# Altium footprint library amirlib.PcbLib: 456 footprints (part 6 of 29)
Each footprint in its own frame and in the unit in brackets; x right, y up, seen from the top. Pads: shape width x height; smd on the part's side, far side on the other; paste and mask are expansions set on the pad; w line width, h text height; cw(c..) or ccw(c..) is an arc to the next point about the centre after c.
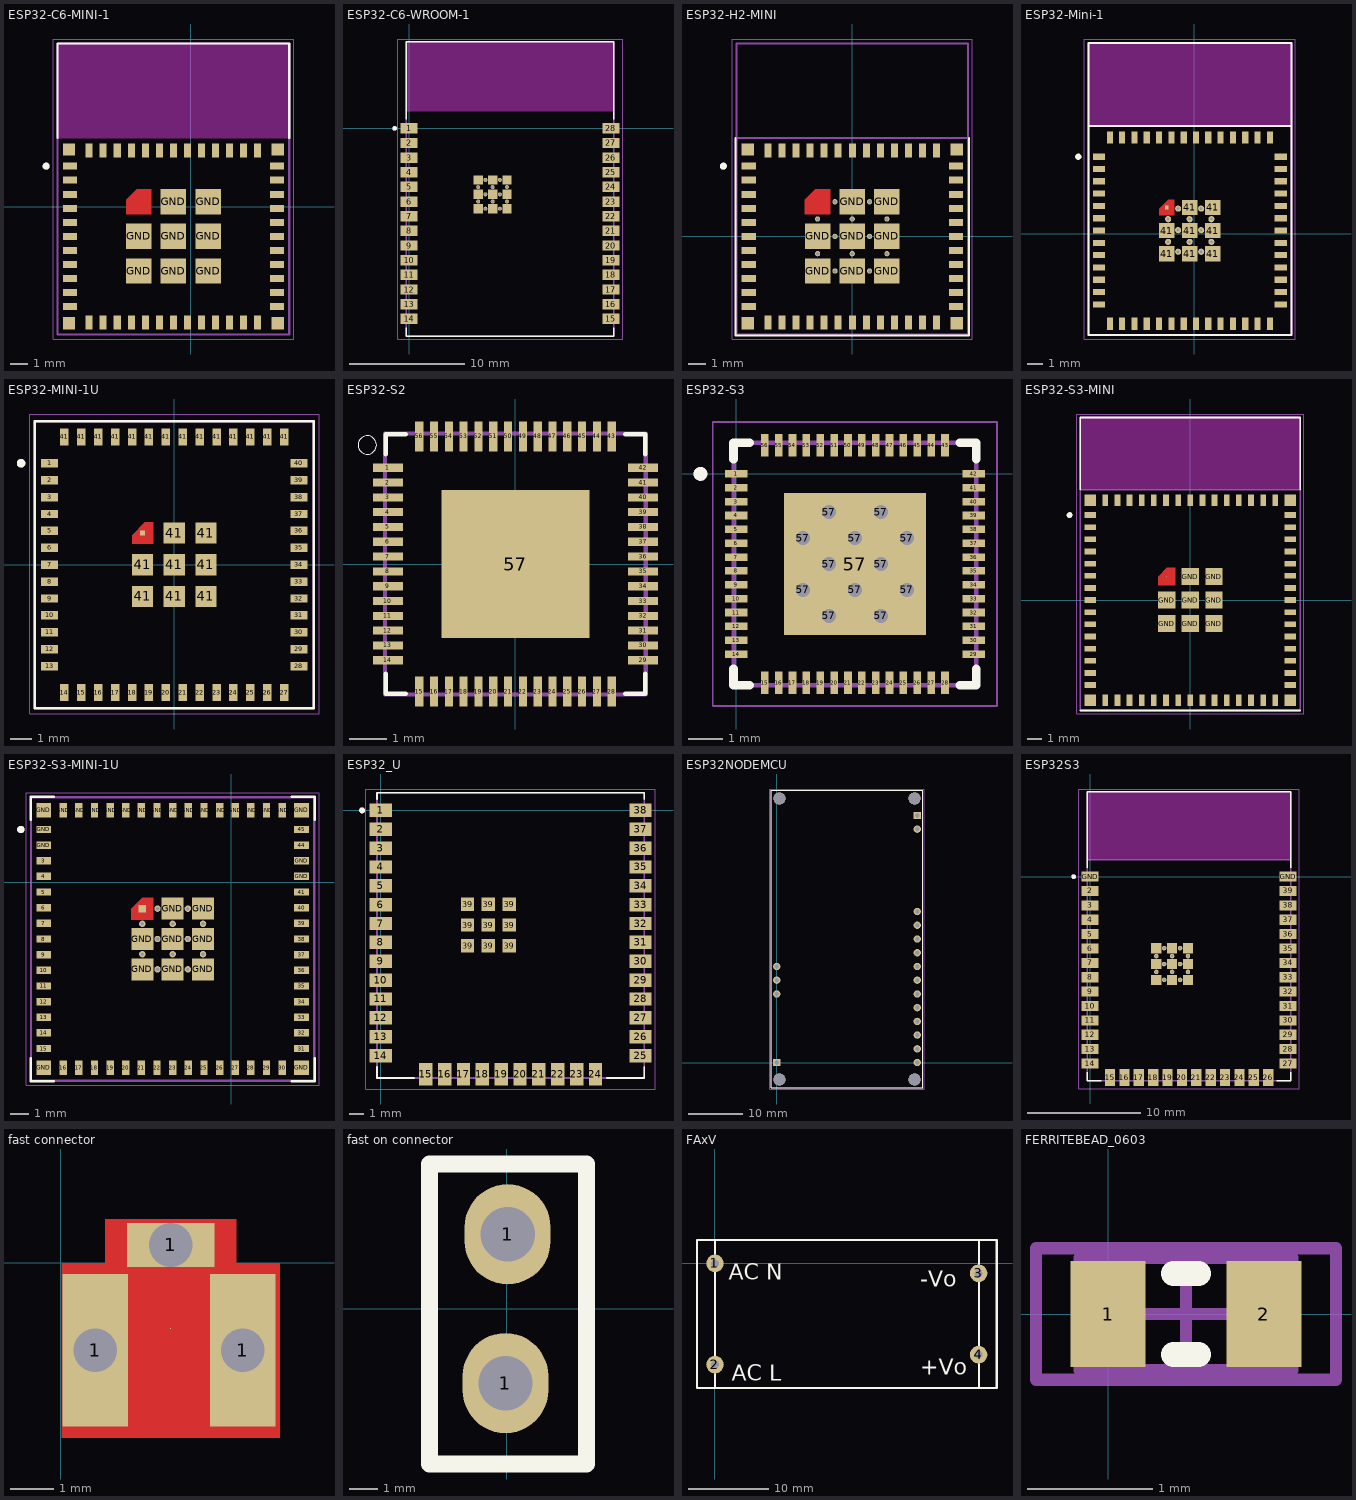
[diagram p5: the footprints below, top view; thin cyan lines are the x and y axes]

## ESP32-C6-MINI-1 [mm]
pads (61):
  rect 0.8x0.4 smd: 3(-6.891,0.724) 4(-6.891,-0.076) 5(-6.891,-0.876) 6(-6.891,-1.676) 7(-6.891,-2.476) 8(-6.891,-3.276) 9(-6.891,-4.076) 10(-6.891,-4.876) 25(4.909,-5.676) 26(4.909,-4.876) 27(4.909,-4.076) 28(4.909,-3.276) 29(4.909,-2.476) 30(4.909,-1.676) 31(4.909,-0.876) 32(4.909,-0.076) 33(4.909,0.724) 34(4.909,1.524) 35(4.909,2.324) GND(-6.891,-5.676) GND(-6.891,1.524) GND(-6.891,2.324)
  rect 0.4x0.8 smd: 12(-5.791,-6.576) 13(-4.991,-6.576) 15(-3.391,-6.576) 16(-2.591,-6.576) 17(-1.791,-6.576) 18(-0.991,-6.576) 19(-0.191,-6.576) 20(0.609,-6.576) 21(1.409,-6.576) 22(2.209,-6.576) 23(3.009,-6.576) 24(3.809,-6.576) GND(-5.791,3.224) GND(-4.991,3.224) GND(-4.191,-6.576) GND(-4.191,3.224) GND(-3.391,3.224) GND(-2.591,3.224) GND(-1.791,3.224) GND(-0.991,3.224) GND(-0.191,3.224) GND(0.609,3.224) GND(1.409,3.224) GND(2.209,3.224) GND(3.009,3.224) GND(3.809,3.224)
  rect 0.7x0.7 smd: GND(-6.941,-6.626) GND(-6.941,3.274) GND(4.959,-6.626) GND(4.959,3.274)
  rect 1.45x1.45 smd: GND(-2.966,-3.651) GND(-2.966,-1.676) GND(-0.991,-3.651) GND(-0.991,-1.676) GND(-0.991,0.299) GND(0.984,-3.651) GND(0.984,-1.676) GND(0.984,0.299)
  round 0.025 smd: GND(-2.966,0.299)
Top Layer:
  region: -3.691,-0.426 -2.241,-0.426 -2.241,1.024 -3.091,1.024 -3.691,0.424
Top Overlay:
  circle w0.2: c-8.241,2.324 r0.1
  lines w0.127: -7.591,3.944 -7.591,9.324 5.609,9.324 5.609,3.944
Keep-Out Layer:
  region: 5.609,3.924 -7.591,3.924 -7.591,9.324 5.609,9.324
Mechanical 13:
  circle w0.2: c-8.241,2.324 r0.1
  lines w0.127: -7.591,-7.276 5.609,-7.276 5.609,9.324 -7.591,9.324 -7.591,-7.276
Mechanical 15:
  lines w0.05: -7.841,-7.526 -7.841,9.574 5.859,9.574 5.859,-7.526 -7.841,-7.526
3D body "step_temp.STEP": height 2.55, standoff 0, extent -7.591,-7.276 5.609,9.324

## ESP32-C6-WROOM-1 [mm]
pads (49):
  rect 1.5x0.9 smd: 1(0,0) 2(0,-1.27) 3(0,-2.54) 4(0,-3.81) 5(0,-5.08) 6(0,-6.35) 7(0,-7.62) 8(0,-8.89) 9(0,-10.16) 10(0,-11.43) 11(0,-12.7) 12(0,-13.97) 13(0,-15.24) 14(0,-16.51) 15(17.5,-16.51) 16(17.5,-15.24) 17(17.5,-13.97) 18(17.5,-12.7) 19(17.5,-11.43) 20(17.5,-10.16) 21(17.5,-8.89) 22(17.5,-7.62) 23(17.5,-6.35) 24(17.5,-5.08) 25(17.5,-3.81) 26(17.5,-2.54) 27(17.5,-1.27) 28(17.5,0)
  rect 0.8x0.8 smd: 29_1(5.995,-4.47) 29_2(7.245,-4.47) 29_3(8.495,-4.47) 29_4(5.995,-5.72) 29_5(7.245,-5.72) 29_6(8.495,-5.72) 29_7(5.995,-6.97) 29_8(7.245,-6.97) 29_9(8.495,-6.97)
  round 0.35 hole 0.25 mask+0: 30_1(6.62,-4.47) 30_2(7.87,-4.47) 30_3(5.995,-5.095) 30_4(7.245,-5.095) 30_5(8.495,-5.095) 30_6(6.62,-5.72) 30_7(7.87,-5.72) 30_8(5.995,-6.345) 30_9(7.245,-6.345) 30_10(8.495,-6.345) 30_11(6.62,-6.97) 30_12(7.87,-6.97)
Top Overlay:
  circle w0.2: c-1.25,-0.01 r0.1
  lines w0.127: -0.25,-17.28 -0.25,-18.01 17.75,-18.01 17.75,-17.28 ; -0.25,0.77 -0.25,7.49 17.75,7.49 17.75,0.77
Keep-Out Layer:
  region: 17.75,1.49 -0.25,1.49 -0.25,7.49 17.75,7.49
Mechanical 13:
  circle w0.2: c-1.25,-0.01 r0.1
  lines w0.127: -0.25,-18.01 -0.25,7.49 17.75,7.49 17.75,-18.01 -0.25,-18.01
Mechanical 15:
  lines w0.05: -1,-18.26 18.5,-18.26 18.5,7.74 -1,7.74 -1,-18.26
3D body "step_temp.STEP": height 3.25, standoff 0, extent -0.25,-18.01 17.75,7.49

## ESP32-H2-MINI [mm]
pads (73):
  rect 0.8x0.4 smd: 3(-5.9,2.4) 4(-5.9,1.6) 5(-5.9,0.8) 6(-5.9,0) 7(-5.9,-0.8) 8(-5.9,-1.6) 9(-5.9,-2.4) 10(-5.9,-3.2) 25(5.9,-4) 26(5.9,-3.2) 27(5.9,-2.4) 28(5.9,-1.6) 29(5.9,-0.8) 30(5.9,0) 31(5.9,0.8) 32(5.9,1.6) 33(5.9,2.4) 34(5.9,3.2) 35(5.9,4) GND(-5.9,-4) GND(-5.9,3.2) GND(-5.9,4)
  rect 0.4x0.8 smd: 12(-4.8,-4.9) 13(-4,-4.9) 15(-2.4,-4.9) 16(-1.6,-4.9) 17(-0.8,-4.9) 18(0,-4.9) 19(0.8,-4.9) 20(1.6,-4.9) 21(2.4,-4.9) 22(3.2,-4.9) 23(4,-4.9) 24(4.8,-4.9) GND(-4.8,4.9) GND(-4,4.9) GND(-3.2,-4.9) GND(-3.2,4.9) GND(-2.4,4.9) GND(-1.6,4.9) GND(-0.8,4.9) GND(0,4.9) GND(0.8,4.9) GND(1.6,4.9) GND(2.4,4.9) GND(3.2,4.9) GND(4,4.9) GND(4.8,4.9)
  round 0.3 hole 0.2 mask+0: 54(-0.988,1.975) 55(0.988,1.975) 56(-1.975,0.988) 57(0,0.988) 58(1.975,0.988) 59(-0.988,0) 60(0.988,0) 61(-1.975,-0.987) 62(0,-0.987) 63(1.975,-0.987) 64(-0.988,-1.975) 65(0.988,-1.975)
  rect 0.7x0.7 smd: GND(-5.95,-4.95) GND(-5.95,4.95) GND(5.95,-4.95) GND(5.95,4.95)
  rect 1.45x1.45 smd: GND(-1.975,-1.975) GND(-1.975,0) GND(0,-1.975) GND(0,0) GND(0,1.975) GND(1.975,-1.975) GND(1.975,0) GND(1.975,1.975)
  round 0.025 smd: GND(-1.975,1.975)
Top Layer:
  region: -1.25,1.25 -2.7,1.25 -2.7,2.1 -2.1,2.7 -1.25,2.7
Top Overlay:
  circle w0.2: c-7.35,4 r0.1
  lines w0.127: -6.65,5.6 -6.65,-5.65 6.65,-5.65 6.65,5.6
Mechanical 13:
  circle w0.2: c-7.35,4 r0.1
  lines w0.127: -6.6,5.6 -6.6,11 6.6,11 6.6,5.6 ; -6.6,5.6 -6.6,-5.6 6.6,-5.6 6.6,5.6 ; -6.6,5.6 6.6,5.6
Mechanical 15:
  lines w0.05: -6.85,-5.85 -6.85,11.25 6.85,11.25 6.85,-5.85 -6.85,-5.85
3D body "step_temp.STEP": height 2.55, standoff 0, extent -6.596,-5.555 6.604,11.045

## ESP32-Mini-1 [mm]
pads (75):
  rect 0.8x0.4 smd: 1(-6.179,5.003) 2(-6.179,4.203) 3(-6.179,3.403) 4(-6.179,2.603) 5(-6.179,1.803) 6(-6.179,1.003) 7(-6.179,0.203) 8(-6.179,-0.597) 9(-6.179,-1.397) 10(-6.179,-2.197) 11(-6.179,-2.997) 12(-6.179,-3.797) 13(-6.179,-4.597) 28(5.621,-4.597) 29(5.621,-3.797) 30(5.621,-2.997) 31(5.621,-2.197) 32(5.621,-1.397) 33(5.621,-0.597) 34(5.621,0.203) 35(5.621,1.003) 36(5.621,1.803) 37(5.621,2.603) 38(5.621,3.403) 39(5.621,4.203) 40(5.621,5.003)
  rect 0.4x0.8 smd: 14(-5.479,-5.847) 15(-4.679,-5.847) 16(-3.879,-5.847) 17(-3.079,-5.847) 18(-2.279,-5.847) 19(-1.479,-5.847) 20(-0.679,-5.847) 21(0.121,-5.847) 22(0.921,-5.847) 23(1.721,-5.847) 24(2.521,-5.847) 25(3.321,-5.847) 26(4.121,-5.847) 27(4.921,-5.847) 41(-5.479,6.253) 41(-4.679,6.253) 41(-3.879,6.253) 41(-3.079,6.253) 41(-2.279,6.253) 41(-1.479,6.253) 41(-0.679,6.253) 41(0.121,6.253) 41(0.921,6.253) 41(1.721,6.253) 41(2.521,6.253) 41(3.321,6.253) 41(4.121,6.253) 41(4.921,6.253)
  rect 1x1 smd: 41(-1.779,-1.297) 41(-1.779,0.203) 41(-0.279,-1.297) 41(-0.279,0.203) 41(-0.279,1.703) 41(1.221,-1.297) 41(1.221,0.203) 41(1.221,1.703)
  rect 0.25x0.25 smd paste-1 mask+0: 41(-1.779,1.703)
  round 0.4 hole 0.2 mask+0: 41(-1.691,-0.533) 41(-1.691,0.94) 41(-1.041,-1.174) 41(-1.041,0.226) 41(-1.041,1.626) 41(-0.291,-0.533) 41(-0.291,0.94) 41(0.457,-1.174) 41(0.457,0.226) 41(0.457,1.626) 41(1.118,-0.533) 41(1.118,0.94)
Top Layer:
  region: -1.279,1.203 -2.279,1.203 -2.279,1.603 -1.679,2.203 -1.279,2.203
Top Overlay:
  circle w0.2: c-7.529,5.003 r0.1
  lines w0.127: -6.879,7.003 6.321,7.003 ; -6.879,-6.597 6.321,-6.597 6.321,12.403 -6.879,12.403 -6.879,-6.597
Top Paste:
  region: -1.279,1.223 -1.279,1.203 -2.279,1.203 -2.279,1.603 -1.679,2.203 -1.279,2.203
Top Solder:
  region: -1.179,1.103 -2.379,1.103 -2.379,1.653 -1.729,2.303 -1.179,2.303
Keep-Out Layer:
  region: 6.321,7.003 -6.879,7.003 -6.879,12.403 6.321,12.403
Mechanical 13:
  circle w0.2: c-7.529,5.003 r0.1
  lines w0.127: -6.879,-6.597 -6.879,12.403 6.321,12.403 6.321,-6.597 -6.879,-6.597
Mechanical 15:
  lines w0.05: -7.129,-6.847 -7.129,12.653 6.571,12.653 6.571,-6.847 -7.129,-6.847
3D body "ESP32-MINI-1 3D Model.STEP": height 2.4, standoff 0, extent -6.901,-6.554 6.299,12.446

## ESP32-MINI-1U [mm]
pads (63):
  rect 0.8x0.4 smd: 1(-5.9,4.8) 2(-5.9,4) 3(-5.9,3.2) 4(-5.9,2.4) 5(-5.9,1.6) 6(-5.9,0.8) 7(-5.9,0) 8(-5.9,-0.8) 9(-5.9,-1.6) 10(-5.9,-2.4) 11(-5.9,-3.2) 12(-5.9,-4) 13(-5.9,-4.8) 28(5.9,-4.8) 29(5.9,-4) 30(5.9,-3.2) 31(5.9,-2.4) 32(5.9,-1.6) 33(5.9,-0.8) 34(5.9,0) 35(5.9,0.8) 36(5.9,1.6) 37(5.9,2.4) 38(5.9,3.2) 39(5.9,4) 40(5.9,4.8)
  rect 0.4x0.8 smd: 14(-5.2,-6.05) 15(-4.4,-6.05) 16(-3.6,-6.05) 17(-2.8,-6.05) 18(-2,-6.05) 19(-1.2,-6.05) 20(-0.4,-6.05) 21(0.4,-6.05) 22(1.2,-6.05) 23(2,-6.05) 24(2.8,-6.05) 25(3.6,-6.05) 26(4.4,-6.05) 27(5.2,-6.05) 41(-5.2,6.05) 41(-4.4,6.05) 41(-3.6,6.05) 41(-2.8,6.05) 41(-2,6.05) 41(-1.2,6.05) 41(-0.4,6.05) 41(0.4,6.05) 41(1.2,6.05) 41(2,6.05) 41(2.8,6.05) 41(3.6,6.05) 41(4.4,6.05) 41(5.2,6.05)
  rect 1x1 smd: 41(-1.5,-1.5) 41(-1.5,0) 41(0,-1.5) 41(0,0) 41(0,1.5) 41(1.5,-1.5) 41(1.5,0) 41(1.5,1.5)
  rect 0.25x0.25 smd paste-1 mask+0: 41(-1.5,1.5)
Top Layer:
  region: -1,1 -2,1 -2,1.4 -1.4,2 -1,2
Top Overlay:
  circle w0.2: c-7.25,4.8 r0.1
  lines w0.127: -6.6,-6.8 6.6,-6.8 6.6,6.787 -6.6,6.787 -6.6,-6.8
Top Paste:
  region: -1,1.02 -1,1 -2,1 -2,1.4 -1.4,2 -1,2
Top Solder:
  region: -0.9,0.9 -2.1,0.9 -2.1,1.45 -1.45,2.1 -0.9,2.1
Mechanical 13:
  circle w0.2: c-7.25,4.8 r0.1
  lines w0.127: -6.6,-6.8 6.6,-6.8 6.6,6.787 -6.6,6.787 -6.6,-6.8
Mechanical 15:
  lines w0.05: -6.85,-7.05 6.85,-7.05 6.85,7.117 -6.85,7.117 -6.85,-7.05
3D body "ESP32-MINI-1U (1).STEP": height 2.46, standoff 0, extent -6.628,-6.771 6.572,6.729

## ESP32-S2 [mm]
pads (57):
  rect 0.81x0.22 smd: 1(-3.445,2.6) 2(-3.445,2.2) 3(-3.445,1.8) 4(-3.445,1.4) 5(-3.445,1) 6(-3.445,0.6) 7(-3.445,0.2) 8(-3.445,-0.2) 9(-3.445,-0.6) 10(-3.445,-1) 11(-3.445,-1.4) 12(-3.445,-1.8) 13(-3.445,-2.2) 14(-3.445,-2.6) 29(3.445,-2.6) 30(3.445,-2.2) 31(3.445,-1.8) 32(3.445,-1.4) 33(3.445,-1) 34(3.445,-0.6) 35(3.445,-0.2) 36(3.445,0.2) 37(3.445,0.6) 38(3.445,1) 39(3.445,1.4) 40(3.445,1.8) 41(3.445,2.2) 42(3.445,2.6)
  rect 0.22x0.81 smd: 15(-2.6,-3.445) 16(-2.2,-3.445) 17(-1.8,-3.445) 18(-1.4,-3.445) 19(-1,-3.445) 20(-0.6,-3.445) 21(-0.2,-3.445) 22(0.2,-3.445) 23(0.6,-3.445) 24(1,-3.445) 25(1.4,-3.445) 26(1.8,-3.445) 27(2.2,-3.445) 28(2.6,-3.445) 43(2.6,3.445) 44(2.2,3.445) 45(1.8,3.445) 46(1.4,3.445) 47(1,3.445) 48(0.6,3.445) 49(0.2,3.445) 50(-0.2,3.445) 51(-0.6,3.445) 52(-1,3.445) 53(-1.4,3.445) 54(-1.8,3.445) 55(-2.2,3.445) 56(-2.6,3.445)
  rect 4x4 smd: 57(0,0)
Top Overlay:
  circle w0: c-4.004,3.214 r0.25
  lines w0.12: -3.5,-2.964 -3.5,-3.5 -2.964,-3.5 ; -3.5,2.964 -3.5,3.5 -2.964,3.5 ; 2.964,-3.5 3.5,-3.5 3.5,-2.964 ; 2.964,3.5 3.5,3.5 3.5,2.964
Mechanical 13:
  lines w0.12: -3.525,-3.525 3.525,-3.525 3.525,3.525 -3.525,3.525 -3.525,-3.525
3D body "ESP32-S2.STEP": height 0.9, standoff 0, extent -3.5,-3.5 3.5,3.5

## ESP32-S3 [mm]
pads (69):
  rect 0.65x0.22 smd mask+0.05: 1(0,0) 2(0,-0.4) 3(0,-0.8) 4(0,-1.2) 5(0,-1.6) 6(0,-2) 7(0,-2.4) 8(0,-2.8) 9(0,-3.2) 10(0,-3.6) 11(0,-4) 12(0,-4.4) 13(0,-4.8) 14(0,-5.2) 29(6.85,-5.2) 30(6.85,-4.8) 31(6.85,-4.4) 32(6.85,-4) 33(6.85,-3.6) 34(6.85,-3.2) 35(6.85,-2.8) 36(6.85,-2.4) 37(6.85,-2) 38(6.85,-1.6) 39(6.85,-1.2) 40(6.85,-0.8) 41(6.85,-0.4) 42(6.85,0)
  rect 0.22x0.65 smd mask+0.05: 15(0.825,-6.025) 16(1.225,-6.025) 17(1.625,-6.025) 18(2.025,-6.025) 19(2.425,-6.025) 20(2.825,-6.025) 21(3.225,-6.025) 22(3.625,-6.025) 23(4.025,-6.025) 24(4.425,-6.025) 25(4.825,-6.025) 26(5.225,-6.025) 27(5.625,-6.025) 28(6.025,-6.025) 43(6.025,0.825) 44(5.625,0.825) 45(5.225,0.825) 46(4.825,0.825) 47(4.425,0.825) 48(4.025,0.825) 49(3.625,0.825) 50(3.225,0.825) 51(2.825,0.825) 52(2.425,0.825) 53(2.025,0.825) 54(1.625,0.825) 55(1.225,0.825) 56(0.825,0.825)
  round 0.5 hole 0.4 mask+0: 57(1.925,-3.35) 57(1.925,-1.85) 57(2.675,-4.1) 57(2.675,-2.6) 57(2.675,-1.1) 57(3.425,-3.35) 57(3.425,-1.85) 57(4.175,-4.1) 57(4.175,-2.6) 57(4.175,-1.1) 57(4.925,-3.35) 57(4.925,-1.85)
  rect 4.1x4.1 smd paste-1.55: 57(3.425,-2.6)
Top Overlay:
  circle w0.2: c-1.03,0 r0.1
  lines w0.25: -0.075,-5.63 -0.075,-6.1 0.395,-6.1 ; -0.075,0.43 -0.075,0.9 0.395,0.9 ; 6.455,-6.1 6.925,-6.1 6.925,-5.63 ; 6.455,0.9 6.925,0.9 6.925,0.43
Top Paste:
  region: 2.425,-1.6 1.425,-1.6 1.425,-0.6 2.425,-0.6
  region: 2.425,-3.1 1.425,-3.1 1.425,-2.1 2.425,-2.1
  region: 2.425,-4.6 1.425,-4.6 1.425,-3.6 2.425,-3.6
  region: 3.925,-4.6 2.925,-4.6 2.925,-3.6 3.925,-3.6
  region: 5.425,-4.6 4.425,-4.6 4.425,-3.6 5.425,-3.6
  region: 5.425,-3.1 4.425,-3.1 4.425,-2.1 5.425,-2.1
  region: 5.425,-1.6 4.425,-1.6 4.425,-0.6 5.425,-0.6
  region: 3.925,-1.6 2.925,-1.6 2.925,-0.6 3.925,-0.6
Mechanical 13:
  circle w0.2: c-1.03,0 r0.1
  lines w0.127: -0.075,-6.1 -0.075,0.9 6.925,0.9 6.925,-6.1 -0.075,-6.1
Mechanical 15:
  lines w0.05: -0.675,-6.7 -0.675,1.5 7.525,1.5 7.525,-6.7 -0.675,-6.7
3D body "step_temp.STEP": height 0.9, standoff 0, extent -0.075,-6.1 6.925,0.9

## ESP32-S3-MINI [mm]
pads (73):
  rect 0.8x0.4 smd: 3(-7,4.25) 4(-7,3.4) 5(-7,2.55) 6(-7,1.7) 7(-7,0.85) 8(-7,0) 9(-7,-0.85) 10(-7,-1.7) 11(-7,-2.55) 12(-7,-3.4) 13(-7,-4.25) 14(-7,-5.1) 15(-7,-5.95) 31(7,-5.95) 32(7,-5.1) 33(7,-4.25) 34(7,-3.4) 35(7,-2.55) 36(7,-1.7) 37(7,-0.85) 38(7,0) 39(7,0.85) 40(7,1.7) 41(7,2.55) 44(7,5.1) 45(7,5.95) GND(-7,5.1) GND(-7,5.95) GND(7,3.4) GND(7,4.25)
  rect 0.4x0.8 smd: 16(-5.95,-7) 17(-5.1,-7) 18(-4.25,-7) 19(-3.4,-7) 20(-2.55,-7) 21(-1.7,-7) 22(-0.85,-7) 23(0,-7) 24(0.85,-7) 25(1.7,-7) 26(2.55,-7) 27(3.4,-7) 28(4.25,-7) 29(5.1,-7) 30(5.95,-7) GND(-5.95,7) GND(-5.1,7) GND(-4.25,7) GND(-3.4,7) GND(-2.55,7) GND(-1.7,7) GND(-0.85,7) GND(0,7) GND(0.85,7) GND(1.7,7) GND(2.55,7) GND(3.4,7) GND(4.25,7) GND(5.1,7) GND(5.95,7)
  rect 0.8x0.8 smd: GND(-7,-7) GND(-7,7) GND(7,-7) GND(7,7)
  round 0.025 smd: GND(-1.65,1.65)
  rect 1.2x1.2 smd: GND(-1.65,-1.65) GND(-1.65,0) GND(0,-1.65) GND(0,0) GND(0,1.65) GND(1.65,-1.65) GND(1.65,0) GND(1.65,1.65)
Top Layer:
  region: -1.05,1.05 -2.25,1.05 -2.25,1.65 -1.65,2.25 -1.05,2.25
  region: -2.25,1.05 -1.05,1.05 -1.05,2.25 -1.65,2.25 -2.25,1.65
Top Overlay:
  circle w0.2: c-8.45,5.95 r0.1
  lines w0.127: -7.7,-7.725 7.7,-7.725 ; -7.7,7.725 -7.7,12.775 7.7,12.775 7.7,7.725
Keep-Out Layer:
  region: 7.7,7.725 -7.7,7.725 -7.7,12.775 7.7,12.775
  region: 7.7,7.725 -7.7,7.725 -7.7,12.775 7.7,12.775
Mechanical 13:
  circle w0.2: c-8.45,5.95 r0.1
  lines w0.127: -7.7,7.725 7.7,7.725 ; -7.7,7.725 -7.7,12.775 7.7,12.775 7.7,7.725 ; -7.7,7.725 -7.7,-7.725 7.7,-7.725 7.7,7.725
Mechanical 15:
  lines w0.05: -7.95,-7.975 7.95,-7.975 7.95,13.025 -7.95,13.025 -7.95,-7.975
3D body "step_temp.STEP": height 2.55, standoff 0, extent -7.7,-7.725 7.7,12.775

## ESP32-S3-MINI-1U [mm]
pads (85):
  rect 0.8x0.4 smd: 3(-10.175,1.177) 4(-10.175,0.327) 5(-10.175,-0.523) 6(-10.175,-1.373) 7(-10.175,-2.223) 8(-10.175,-3.073) 9(-10.175,-3.923) 10(-10.175,-4.773) 11(-10.175,-5.623) 12(-10.175,-6.473) 13(-10.175,-7.323) 14(-10.175,-8.173) 15(-10.175,-9.023) 31(3.825,-9.023) 32(3.825,-8.173) 33(3.825,-7.323) 34(3.825,-6.473) 35(3.825,-5.623) 36(3.825,-4.773) 37(3.825,-3.923) 38(3.825,-3.073) 39(3.825,-2.223) 40(3.825,-1.373) 41(3.825,-0.523) 44(3.825,2.027) 45(3.825,2.877) GND(-10.175,2.027) GND(-10.175,2.877) GND(3.825,0.327) GND(3.825,1.177)
  rect 0.4x0.8 smd: 16(-9.125,-10.073) 17(-8.275,-10.073) 18(-7.425,-10.073) 19(-6.575,-10.073) 20(-5.725,-10.073) 21(-4.875,-10.073) 22(-4.025,-10.073) 23(-3.175,-10.073) 24(-2.325,-10.073) 25(-1.475,-10.073) 26(-0.625,-10.073) 27(0.225,-10.073) 28(1.075,-10.073) 29(1.925,-10.073) 30(2.775,-10.073) GND(-9.125,3.927) GND(-8.275,3.927) GND(-7.425,3.927) GND(-6.575,3.927) GND(-5.725,3.927) GND(-4.875,3.927) GND(-4.025,3.927) GND(-3.175,3.927) GND(-2.325,3.927) GND(-1.475,3.927) GND(-0.625,3.927) GND(0.225,3.927) GND(1.075,3.927) GND(1.925,3.927) GND(2.775,3.927)
  rect 0.8x0.8 smd: GND(-10.175,-10.073) GND(-10.175,3.927) GND(3.825,-10.073) GND(3.825,3.927)
  rect 1.2x1.2 smd: GND(-4.825,-4.723) GND(-4.825,-3.073) GND(-3.175,-4.723) GND(-3.175,-3.073) GND(-3.175,-1.423) GND(-1.525,-4.723) GND(-1.525,-3.073) GND(-1.525,-1.423)
  round 0.35 hole 0.2 mask+0: GND(-4.825,-3.898) GND(-4.825,-2.248) GND(-4,-4.723) GND(-4,-3.073) GND(-4,-1.423) GND(-3.175,-3.898) GND(-3.175,-2.248) GND(-2.35,-4.723) GND(-2.35,-3.073) GND(-2.35,-1.423) GND(-1.525,-3.898) GND(-1.525,-2.248)
  rect 0.4x0.4 smd paste-1 mask+0: GND(-4.825,-1.423)
Top Layer:
  region: -4.225,-2.023 -5.425,-2.023 -5.425,-1.423 -4.825,-0.823 -4.225,-0.823
Top Overlay:
  circle w0.2: c-11.425,2.877 r0.1
  lines w0.127: -10.895,-9.543 -10.895,-10.793 -9.645,-10.793 ; -10.895,3.397 -10.895,4.647 -9.645,4.647 ; 3.295,-10.793 4.545,-10.793 4.545,-9.543 ; 3.295,4.647 4.545,4.647 4.545,3.397
Top Paste:
  region: -4.225,-2.023 -5.425,-2.023 -5.425,-1.423 -4.825,-0.823 -4.225,-0.823
Top Solder:
  region: -4.125,-2.123 -5.525,-2.123 -5.525,-1.373 -4.875,-0.723 -4.125,-0.723
Mechanical 13:
  circle w0.2: c-11.425,2.877 r0.1
  lines w0.127: -10.875,-10.773 -10.875,4.627 4.525,4.627 4.525,-10.773 -10.875,-10.773
Mechanical 15:
  lines w0.05: -11.125,-11.023 4.775,-11.023 4.775,4.877 -11.125,4.877 -11.125,-11.023
3D body "step_temp.STEP": height 2.55, standoff 0, extent -10.875,-10.773 4.525,4.627

## ESP32_U [mm]
pads (47):
  rect 1.5x0.9 smd: 1(0,0) 2(0,-1.27) 3(0,-2.54) 4(0,-3.81) 5(0,-5.08) 6(0,-6.35) 7(0,-7.62) 8(0,-8.89) 9(0,-10.16) 10(0,-11.43) 11(0,-12.7) 12(0,-13.97) 13(0,-15.24) 14(0,-16.51) 25(17.5,-16.51) 26(17.5,-15.24) 27(17.5,-13.97) 28(17.5,-12.7) 29(17.5,-11.43) 30(17.5,-10.16) 31(17.5,-8.89) 32(17.5,-7.62) 33(17.5,-6.35) 34(17.5,-5.08) 35(17.5,-3.81) 36(17.5,-2.54) 37(17.5,-1.27) 38(17.5,0)
  rect 0.9x1.5 smd: 15(3.035,-17.76) 16(4.305,-17.76) 17(5.575,-17.76) 18(6.845,-17.76) 19(8.115,-17.76) 20(9.385,-17.76) 21(10.655,-17.76) 22(11.925,-17.76) 23(13.195,-17.76) 24(14.465,-17.76)
  rect 0.9x0.9 smd: 39(5.85,-9.12) 39(5.85,-7.72) 39(5.85,-6.32) 39(7.25,-9.12) 39(7.25,-7.72) 39(7.25,-6.32) 39(8.65,-9.12) 39(8.65,-7.72) 39(8.65,-6.32)
Top Overlay:
  circle w0.2: c-1.25,0 r0.1
  lines w0.127: -0.25,-17.28 -0.25,-18.01 2.265,-18.01 ; -0.25,0.77 -0.25,1.19 17.75,1.19 17.75,0.77 ; 15.235,-18.01 17.75,-18.01 17.75,-17.28
Mechanical 13:
  circle w0.2: c-1.25,0 r0.1
  lines w0.127: -0.25,-18.01 -0.25,1.19 17.75,1.19 17.75,-18.01 -0.25,-18.01
Mechanical 15:
  lines w0.05: -1,-18.76 -1,1.44 18.5,1.44 18.5,-18.76 -1,-18.76
3D body "step_temp.STEP": height 3.35, standoff 0, extent -0.25,-18.01 17.75,1.19

## ESP32NODEMCU [mm]
pads (22):
  rect 1.35x1.35 hole 0.9: J4_1(26,45.72) J5_1(0,0)
  round 1.35 hole 0.9: J4_2(26,43.18) J4_8(26,27.94) J4_9(26,25.4) J4_10(26,22.86) J4_11(26,20.32) J4_12(26,17.78) J4_13(26,15.24) J4_14(26,12.7) J4_15(26,10.16) J4_16(26,7.62) J4_17(26,5.08) J4_18(26,2.54) J4_19(26,0) J5_6(0,12.7) J5_7(0,15.24) J5_8(0,17.78)
  round 2.25 hole 2.25 unplated: ""(0.5,-3.14) ""(0.5,48.86) ""(25.5,-3.14) ""(25.5,48.86)
Top Overlay:
  lines w0.127: -1,-4.64 -1,50.36 27,50.36 27,-4.64 -1,-4.64
Mechanical 13:
  lines w0.127: -1,-4.64 27,-4.64 27,50.36 -1,50.36 -1,-4.64
Mechanical 15:
  lines w0.05: -1.25,-4.89 -1.25,50.61 27.25,50.61 27.25,-4.89 -1.25,-4.89

## ESP32S3 [mm]
pads (61):
  rect 1.5x0.9 smd: 2(0,-1.27) 3(0,-2.54) 4(0,-3.81) 5(0,-5.08) 6(0,-6.35) 7(0,-7.62) 8(0,-8.89) 9(0,-10.16) 10(0,-11.43) 11(0,-12.7) 12(0,-13.97) 13(0,-15.24) 14(0,-16.51) 27(17.5,-16.51) 28(17.5,-15.24) 29(17.5,-13.97) 30(17.5,-12.7) 31(17.5,-11.43) 32(17.5,-10.16) 33(17.5,-8.89) 34(17.5,-7.62) 35(17.5,-6.35) 36(17.5,-5.08) 37(17.5,-3.81) 38(17.5,-2.54) 39(17.5,-1.27) GND(0,0) GND(17.5,0)
  rect 0.9x1.5 smd: 15(1.765,-17.76) 16(3.035,-17.76) 17(4.305,-17.76) 18(5.575,-17.76) 19(6.845,-17.76) 20(8.115,-17.76) 21(9.385,-17.76) 22(10.655,-17.76) 23(11.925,-17.76) 24(13.195,-17.76) 25(14.465,-17.76) 26(15.735,-17.76)
  rect 0.9x0.9 smd: GND(5.85,-9.12) GND(5.85,-7.72) GND(5.85,-6.32) GND(7.25,-9.12) GND(7.25,-7.72) GND(7.25,-6.32) GND(8.65,-9.12) GND(8.65,-7.72) GND(8.65,-6.32)
  round 0.4 hole 0.2 mask+0: GND(5.85,-8.42) GND(5.85,-7.02) GND(6.55,-9.12) GND(6.55,-7.72) GND(6.55,-6.32) GND(7.25,-8.42) GND(7.25,-7.02) GND(7.95,-9.12) GND(7.95,-7.72) GND(7.95,-6.32) GND(8.65,-8.42) GND(8.65,-7.02)
Top Overlay:
  circle w0.2: c-1.45,0 r0.1
  lines w0.127: -0.25,-17.28 -0.25,-18.01 0.995,-18.01 ; -0.25,0.77 -0.25,7.49 17.75,7.49 17.75,0.77 ; 16.505,-18.01 17.75,-18.01 17.75,-17.28
Keep-Out Layer:
  region: 17.75,1.49 -0.25,1.49 -0.25,7.49 17.75,7.49
  region: 17.75,1.49 -0.25,1.49 -0.25,7.49 17.75,7.49
Mechanical 13:
  circle w0.2: c-1.45,0 r0.1
  lines w0.127: -0.25,1.49 -0.25,-18.01 17.75,-18.01 17.75,1.49 ; -0.25,1.49 -0.25,7.49 17.75,7.49 17.75,1.49 ; -0.25,1.49 17.75,1.49
  text "ANTENNA" at 4.25,4.24 h1.27
Mechanical 15:
  lines w0.05: -1,-18.76 -1,7.74 18.5,7.74 18.5,-18.76 -1,-18.76
3D body "step_temp.STEP": height 3.25, standoff 0, extent -0.25,-18.01 17.75,7.49

## fast connector [mm]
pads (4):
  rect 1.5x3.5 hole 1 square: 1(0.787,-2.007) 1(4.166,-2.007)
  round 0.025 smd: 1(2.513,-1.509)
  rect 2x1 hole 1 square: 1(2.515,0.406)
Top Layer:
  region: 0.013,-4.009 0.013,-0.009 1.013,-0.009 1.013,0.991 4.013,0.991 4.013,-0.009 5.013,-0.009 5.013,-4.009

## fast on connector [mm]
pads (2):
  oval 3x3.5 hole 1.9: 1(-0.037,-2.6) 1(0.038,2.6)
Top Overlay:
  lines w0.6: -2.687,-5.425 -2.687,5.05 2.788,5.05 2.788,-5.425 -2.687,-5.425
3D body "49c8825_62650-1.stp": height 9.5, standoff -2.87, extent -0.438,-3.581 0.362,3.531

## FAxV [mm]
pads (4):
  round 2.2 hole 1 paste-2539.97 mask+0.051: 1(0,0) 2(0,-12.7) 3(33,-1.25) 4(33,-11.45)
Top Overlay:
  lines w0.254: -2.25,-15.6 -2.25,2.9 ; -2.25,-15.6 0,-15.6 0,2.9 -2.25,2.9 ; -2.25,-15.6 -2.25,2.9 ; -2.25,-15.6 35.25,-15.6 35.25,2.9 -2.25,2.9 ; 33.056,-15.6 33.056,2.9 35.306,2.9 35.306,-15.6 33.056,-15.6
  text "+Vo" at 25.7,-13.97 h2.03
  text ".Comment" at 11.22,-8.383 h2.03
  text "-Vo" at 25.7,-2.921 h2.03
  text "AC N" at 1.697,-2.032 h2.03
  text "AC L" at 2.078,-14.732 h2.03

## FERRITEBEAD_0603 [mm]
pads (2):
  rect 0.6x0.85 smd: 1(0,0) 2(1.244,0)
Top Overlay:
  lines w0.2: 0.522,-0.325 0.722,-0.325 ; 0.522,0.325 0.722,0.325
Mechanical 13:
  lines w0.1: -0.228,-0.45 1.472,-0.45 1.472,0.45 -0.228,0.45 -0.228,-0.45
Mechanical 15:
  lines w0.1: 0.172,0 1.072,0 ; 0.622,-0.45 0.622,0.45 ; -0.578,-0.525 1.822,-0.525 1.822,0.525 -0.578,0.525 -0.578,-0.525
3D body "0603.STEP": height 0.45, standoff 0, extent -0.14,-0.381 1.384,0.381